# Altium footprint library 烧录.PcbLib: 2 footprints
Each footprint in its own frame and in the unit in brackets; x right, y up, seen from the top. Pads: shape width x height; smd on the part's side, far side on the other; paste and mask are expansions set on the pad; w line width, h text height; cw(c..) or ccw(c..) is an arc to the next point about the centre after c.
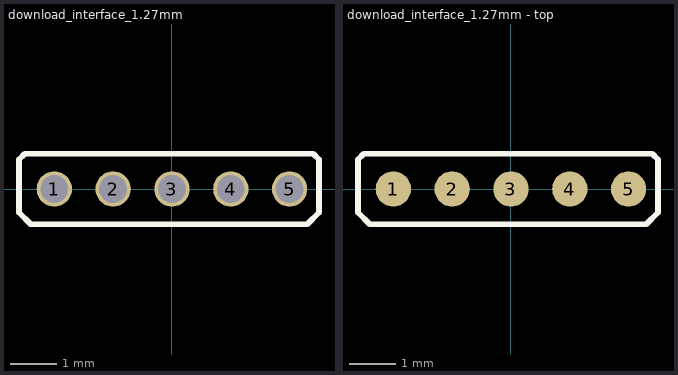
[diagram p0: the footprints below, top view; thin cyan lines are the x and y axes]

## download_interface_1.27mm [mil]
pads (5):
  round 30 hole 23.62: 1(-100,0) 2(-50,0) 3(0,0) 4(50,0) 5(100,0)
Top Overlay:
  lines w5: -130,-20 -120,-30 115,-30 125,-20 125,25 120,30 43.75,30 -48.75,30 -125,30 -130,25 -130,-20

## download_interface_1.27mm - top [mil]
pads (5):
  round 30 smd: 1(-100,0) 2(-50,0) 3(0,0) 4(50,0) 5(100,0)
Top Overlay:
  lines w5: -130,-20 -130,25 -125,30 -48.75,30 43.75,30 120,30 125,25 125,-20 115,-30 -120,-30 -130,-20